# Altium footprint library PAW3395DM-T6QU.PcbLib: 1 footprints
Each footprint in its own frame and in the unit in brackets; x right, y up, seen from the top. Pads: shape width x height; smd on the part's side, far side on the other; paste and mask are expansions set on the pad; w line width, h text height; cw(c..) or ccw(c..) is an arc to the next point about the centre after c.
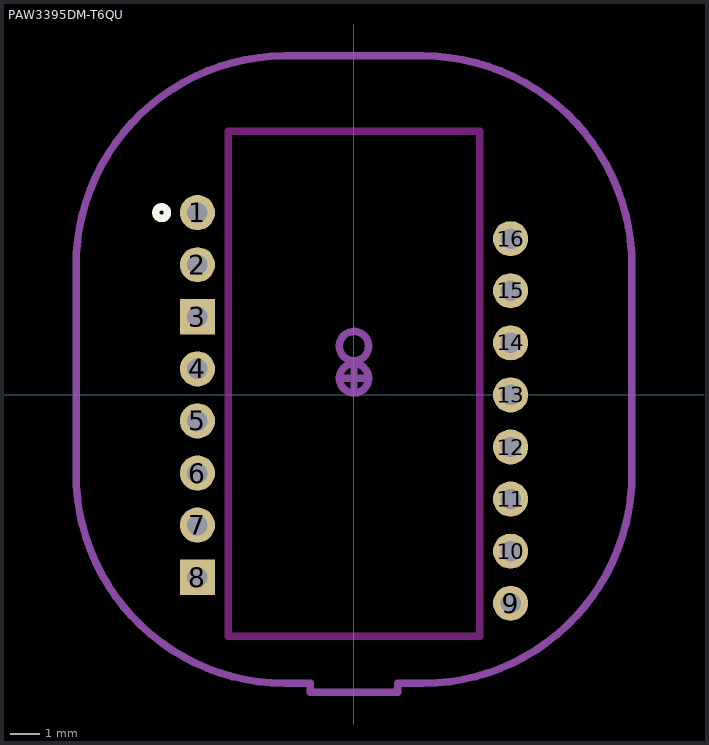
[diagram p0: the footprint, top view; thin cyan lines are the x and y axes]

## PAW3395DM-T6QU [mm] "PixArt PAW3395DM-T6QU optical navigation sensor, 16-pin molded lead-frame DIP, 1.78mm pitch staggered dual row, 10.7mm row spacing, through-hole"
pads (16):
  round 1.2 hole 0.7: 1(-5.334,6.223) 2(-5.334,4.443) 4(-5.334,0.883) 5(-5.334,-0.897) 6(-5.334,-2.677) 7(-5.334,-4.457) 9(5.366,-7.127) 10(5.366,-5.347) 11(5.366,-3.567) 12(5.366,-1.787) 13(5.366,-0.007) 14(5.366,1.773) 15(5.366,3.553) 16(5.366,5.333)
  rect 1.2x1.2 hole 0.7: 3(-5.334,2.663) 8(-5.334,-6.237)
Top Overlay:
  circle w0.254: c-6.559,6.223 r0.2
Keep-Out Layer:
  lines w0.254: -4.284,-8.257 -4.284,9.003 4.316,9.003 4.316,-8.257 -4.284,-8.257
Mechanical 2:
  circle w0.254: c0.016,1.663 r0.5
  lines w0.254: -0.334,0.563 0.316,0.563 ; 0.016,0.273 0.016,0.873
Mechanical 3:
  lines w0.254: -9.484,-2.667 ccw(c-2.322,-2.705) -2.359,-9.867 -1.484,-9.867 -1.484,-10.167 1.516,-10.167 1.516,-9.867 2.391,-9.867 ccw(c2.354,-2.705) 9.516,-2.667 9.516,4.383 ccw(c2.354,4.421) 2.391,11.583 -2.359,11.583 ccw(c-2.322,4.421) -9.484,4.383 -9.484,-2.667
Mechanical 7:
  circle w0.254: c0.016,0.563 r0.5